# Altium footprint library HFPB_01-PCBLib.PcbLib: 102 footprints (part 6 of 7)
Each footprint in its own frame and in the unit in brackets; x right, y up, seen from the top. Pads: shape width x height; smd on the part's side, far side on the other; paste and mask are expansions set on the pad; w line width, h text height; cw(c..) or ccw(c..) is an arc to the next point about the centre after c.
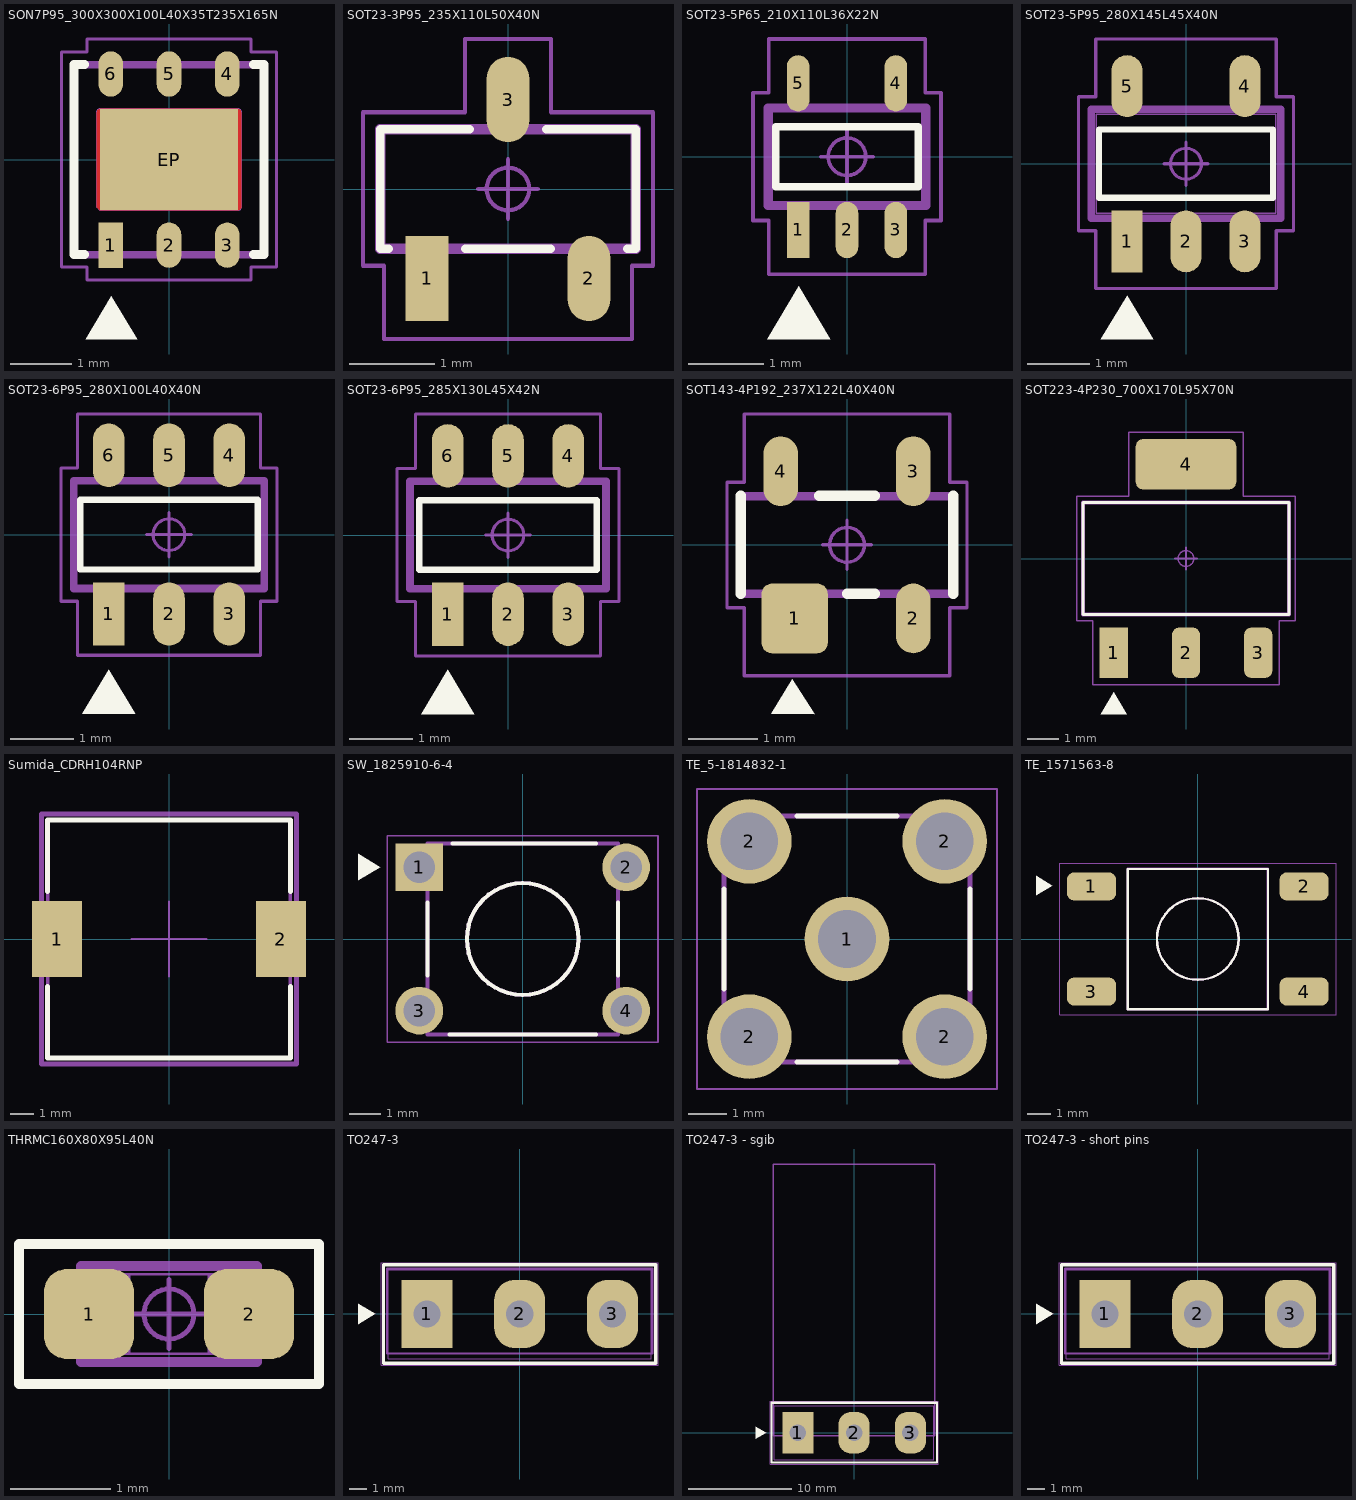
[diagram p5: the footprints below, top view; thin cyan lines are the x and y axes]

## SON7P95_300X300X100L40X35T235X165N [mm] "Small Outline No-Lead (SON with Tab), 0.95 mm pitch; 6 pin, 3.00 mm L X 3.00 mm W X 1.00 mm H body"
height 1
pads (7):
  rect 0.4x0.74 smd: 1(-0.95,-1.395)
  oval 0.4x0.74 smd: 2(0,-1.395) 3(0.95,-1.395) 4(0.95,1.395) 5(0,1.395) 6(-0.95,1.395)
  rect 2.25x1.65 smd paste-2.25 mask-2.25: EP(0,0)
Top Layer:
  region: 1.175,0 1.175,-0.775 1.174,-0.783 1.173,-0.79 1.17,-0.798 1.165,-0.804 1.16,-0.81 1.154,-0.816 1.148,-0.82 1.141,-0.823 1.133,-0.824 -1.125,-0.825 -1.175,-0.775 -1.175,0.775 -1.174,0.783 -1.173,0.79 -1.17,0.798 -1.165,0.804 -1.16,0.81 -1.154,0.816 -1.148,0.82 -1.141,0.823 -1.133,0.824 1.125,0.825 1.133,0.824 1.141,0.823 1.148,0.82 1.154,0.816 1.16,0.81 1.165,0.804 1.17,0.798 1.173,0.79 1.174,0.783 1.175,0.775
Top Overlay:
  region: -1.36,-2.925 -0.52,-2.925 -0.94,-2.225
  lines w0.15: -1.375,-1.55 -1.55,-1.55 -1.55,1.55 -1.375,1.55 ; 1.375,-1.55 1.55,-1.55 1.55,1.55 1.375,1.55
Top Paste:
  region: -0.12,0.12 -1.05,0.12 -1.05,0.7 -0.12,0.7
  region: -0.12,-0.7 -1.05,-0.7 -1.05,-0.12 -0.12,-0.12
  region: 1.05,0.12 0.12,0.12 0.12,0.7 1.05,0.7
  region: 1.05,-0.7 0.12,-0.7 0.12,-0.12 1.05,-0.12
Top Solder:
  region: 1.175,0 1.175,-0.775 1.174,-0.783 1.173,-0.79 1.17,-0.798 1.165,-0.804 1.16,-0.81 1.154,-0.816 1.148,-0.82 1.141,-0.823 1.133,-0.824 -1.125,-0.825 -1.175,-0.775 -1.175,0.775 -1.174,0.783 -1.173,0.79 -1.17,0.798 -1.165,0.804 -1.16,0.81 -1.154,0.816 -1.148,0.82 -1.141,0.823 -1.133,0.824 1.125,0.825 1.133,0.824 1.141,0.823 1.148,0.82 1.154,0.816 1.16,0.81 1.165,0.804 1.17,0.798 1.173,0.79 1.174,0.783 1.175,0.775
Mechanical 11:
  lines w0.12: -1.55,-1.55 1.55,-1.55 1.55,1.55 -1.55,1.55 -1.55,-1.55
Mechanical 12:
  lines w0.025: -1.5,-1.5 1.5,-1.5 1.5,1.5 -1.5,1.5 -1.5,-1.5 ; -1.175,-0.775 -1.125,-0.825 1.125,-0.825 ccw(c1.125,-0.775) 1.175,-0.775 1.175,0.775 ccw(c1.125,0.775) 1.125,0.825 -1.125,0.825 ccw(c-1.125,0.775) -1.175,0.775 -1.175,-0.775 ; -1.125,-1.5 -0.775,-1.5 -0.775,-1.275 ccw(c-0.95,-1.275) -1.125,-1.275 -1.125,-1.5 ; -1.125,1.275 ccw(c-0.95,1.275) -0.775,1.275 -0.775,1.5 -1.125,1.5 -1.125,1.275 ; -0.175,-1.5 0.175,-1.5 0.175,-1.275 ccw(c0,-1.275) -0.175,-1.275 -0.175,-1.5 ; -0.175,1.275 ccw(c0,1.275) 0.175,1.275 0.175,1.5 -0.175,1.5 -0.175,1.275 ; 0.775,-1.5 1.125,-1.5 1.125,-1.275 ccw(c0.95,-1.275) 0.775,-1.275 0.775,-1.5 ; 0.775,1.275 ccw(c0.95,1.275) 1.125,1.275 1.125,1.5 0.775,1.5 0.775,1.275
Mechanical 15:
  circle w0.05: c0,0 r0.25
  lines w0.05: -0.35,0 0.35,0 ; 0,-0.35 0,0.35 ; -1.75,-1.75 -1.335,-1.75 -1.335,-1.965 1.335,-1.965 1.335,-1.75 1.75,-1.75 1.75,1.75 1.335,1.75 1.335,1.965 -1.335,1.965 -1.335,1.75 -1.75,1.75 -1.75,-1.75
Mechanical 16:
  text ".Designator" at 0,0 h1.2
3D body "SON7P95_300X300X100L40X35T235X165.STEP": height 1, standoff 0, extent -1.5,-1.55 1.5,1.55

## SOT23-3P95_235X110L50X40N [mm] "Small Outline Transistor (SOT23), 0.95 mm pitch; 3 pin, 2.90 mm L X 1.30 mm W X 1.10 mm H body"
height 1.1
pads (3):
  rect 0.5x1 smd: 1(-0.95,-1.05)
  oval 0.5x1 smd: 2(0.95,-1.05) 3(0,1.05)
Top Overlay:
  lines w0.1: -1.4,-0.7 -1.5,-0.7 -1.5,0.7 -0.45,0.7 ; -0.5,-0.7 0.5,-0.7 ; 0.45,0.7 1.5,0.7 1.5,-0.7 1.4,-0.7
Mechanical 11:
  lines w0.12: -1.5,-0.7 1.5,-0.7 1.5,0.7 -1.5,0.7 -1.5,-0.7
Mechanical 12:
  lines w0.025: -1.45,-0.65 1.45,-0.65 1.45,0.65 -1.45,0.65 -1.45,-0.65 ; -1.15,-1.175 -1.15,-0.675 -0.75,-0.675 -0.75,-1.175 -1.15,-1.175 ; -0.2,0.675 -0.2,1.175 0.2,1.175 0.2,0.675 -0.2,0.675 ; 0.75,-1.175 0.75,-0.675 1.15,-0.675 1.15,-1.175 0.75,-1.175
Mechanical 15:
  circle w0.05: c0,0 r0.25
  lines w0.05: -0.35,0 0.35,0 ; 0,-0.35 0,0.35 ; -1.7,-0.9 -1.455,-0.9 -1.455,-1.76 1.455,-1.76 1.455,-0.9 1.7,-0.9 1.7,0.9 0.505,0.9 0.505,1.76 -0.505,1.76 -0.505,0.9 -1.7,0.9 -1.7,-0.9
Mechanical 16:
  text ".Designator" at 0,0 h1.2
3D body "SOT23-3P95_235X110L50X40.STEP": height 1.1, standoff 0, extent -1.45,-1.175 1.45,1.175

## SOT23-5P65_210X110L36X22N [mm] "Small Outline Transistor (SOT23), 0.65 mm pitch; 5 pin, 2.00 mm L X 1.25 mm W X 1.10 mm H body"
height 1.1
pads (5):
  rect 0.3x0.75 smd: 1(-0.65,-0.975)
  oval 0.3x0.75 smd: 2(0,-0.975) 3(0.65,-0.975) 4(0.65,0.975) 5(-0.65,0.975)
Top Overlay:
  region: -1.06,-2.425 -0.22,-2.425 -0.64,-1.725
  lines w0.1: -0.95,-0.4 0.95,-0.4 0.95,0.4 -0.95,0.4 -0.95,-0.4
Mechanical 11:
  lines w0.12: -1.05,-0.65 -1.05,0.65 1.05,0.65 1.05,-0.65 -1.05,-0.65
Mechanical 12:
  lines w0.025: -1,-0.625 -1,0.625 1,0.625 1,-0.625 -1,-0.625 ; -0.763,-1.05 -0.537,-1.05 -0.537,-0.69 -0.763,-0.69 -0.763,-1.05 ; -0.763,0.69 -0.537,0.69 -0.537,1.05 -0.763,1.05 -0.763,0.69 ; -0.112,-1.05 0.112,-1.05 0.112,-0.69 -0.112,-0.69 -0.112,-1.05 ; 0.537,-1.05 0.763,-1.05 0.763,-0.69 0.537,-0.69 0.537,-1.05 ; 0.537,0.69 0.763,0.69 0.763,1.05 0.537,1.05 0.537,0.69
Mechanical 15:
  circle w0.05: c0,0 r0.25
  lines w0.05: -0.35,0 0.35,0 ; 0,-0.35 0,0.35 ; -1.25,-0.85 -1.25,0.85 -1.04,0.85 -1.04,1.565 1.04,1.565 1.04,0.85 1.25,0.85 1.25,-0.85 1.04,-0.85 1.04,-1.565 -1.04,-1.565 -1.04,-0.85 -1.25,-0.85
Mechanical 16:
  text ".Designator" at 0,0 h1.2
3D body "SOT23-5P65_210X110L36X22.STEP": height 1.12, standoff 0.02, extent -1,-1.05 1,1.05

## SOT23-5P95_280X145L45X40N [mm] "Small Outline Transistor (SOT23), 0.95 mm pitch; 5 pin, 2.90 mm L X 1.60 mm W X 1.45 mm H body"
height 1.45
pads (5):
  rect 0.5x1 smd: 1(-0.95,-1.25)
  oval 0.5x1 smd: 2(0,-1.25) 3(0.95,-1.25) 4(0.95,1.25) 5(-0.95,1.25)
Top Overlay:
  region: -1.37,-2.825 -0.53,-2.825 -0.95,-2.125
  lines w0.1: -1.4,-0.55 1.4,-0.55 1.4,0.55 -1.4,0.55 -1.4,-0.55
Mechanical 11:
  lines w0.12: -1.53,-0.88 1.53,-0.88 1.53,0.88 -1.53,0.88 -1.53,-0.88
Mechanical 12:
  lines w0.025: -1.45,-0.8 1.45,-0.8 1.45,0.8 -1.45,0.8 -1.45,-0.8 ; -1.15,-1.4 -1.15,-0.95 -0.75,-0.95 -0.75,-1.4 -1.15,-1.4 ; -1.15,0.95 -1.15,1.4 -0.75,1.4 -0.75,0.95 -1.15,0.95 ; -0.2,-1.4 -0.2,-0.95 0.2,-0.95 0.2,-1.4 -0.2,-1.4 ; 0.75,-1.4 0.75,-0.95 1.15,-0.95 1.15,-1.4 0.75,-1.4 ; 0.75,0.95 0.75,1.4 1.15,1.4 1.15,0.95 0.75,0.95
Mechanical 15:
  circle w0.05: c0,0 r0.25
  lines w0.05: -0.35,0 0.35,0 ; 0,-0.35 0,0.35 ; -1.73,-1.08 -1.455,-1.08 -1.455,-2.01 1.455,-2.01 1.455,-1.08 1.73,-1.08 1.73,1.08 1.455,1.08 1.455,2.01 -1.455,2.01 -1.455,1.08 -1.73,1.08 -1.73,-1.08
Mechanical 16:
  text ".Designator" at 0,0 h1.2
3D body "SOT23-5P95_280X145L45X40.STEP": height 1.55, standoff 0.1, extent -1.45,-1.4 1.45,1.4

## SOT23-6P95_280X100L40X40N [mm] "Small Outline Transistor (SOT23), 0.95 mm pitch; 6 pin, 2.90 mm L X 1.60 mm W X 1.00 mm H body"
height 1
pads (6):
  rect 0.5x1 smd: 1(-0.95,-1.25)
  oval 0.5x1 smd: 2(0,-1.25) 3(0.95,-1.25) 4(0.95,1.25) 5(0,1.25) 6(-0.95,1.25)
Top Overlay:
  region: -1.37,-2.825 -0.53,-2.825 -0.95,-2.125
  lines w0.1: -1.4,-0.55 1.4,-0.55 1.4,0.55 -1.4,0.55 -1.4,-0.55
Mechanical 11:
  lines w0.12: -1.5,-0.85 -1.5,0.85 1.5,0.85 1.5,-0.85 -1.5,-0.85
Mechanical 12:
  lines w0.025: -1.45,-0.8 -1.45,0.8 1.45,0.8 1.45,-0.8 -1.45,-0.8 ; -1.15,-1.4 -0.75,-1.4 -0.75,-1 -1.15,-1 -1.15,-1.4 ; -1.15,1 -0.75,1 -0.75,1.4 -1.15,1.4 -1.15,1 ; -0.2,-1.4 0.2,-1.4 0.2,-1 -0.2,-1 -0.2,-1.4 ; -0.2,1 0.2,1 0.2,1.4 -0.2,1.4 -0.2,1 ; 0.75,-1.4 1.15,-1.4 1.15,-1 0.75,-1 0.75,-1.4 ; 0.75,1 1.15,1 1.15,1.4 0.75,1.4 0.75,1
Mechanical 15:
  circle w0.05: c0,0 r0.25
  lines w0.05: -0.35,0 0.35,0 ; 0,-0.35 0,0.35 ; -1.7,-1.05 -1.7,1.05 -1.44,1.05 -1.44,1.9 1.44,1.9 1.44,1.05 1.7,1.05 1.7,-1.05 1.44,-1.05 1.44,-1.9 -1.44,-1.9 -1.44,-1.05 -1.7,-1.05
Mechanical 16:
  text ".Designator" at -1.625,2.175 h1.2
3D body "SOT23-6P95_280X100L40X40.STEP": height 1, standoff 0, extent -1.45,-1.4 1.45,1.4

## SOT23-6P95_285X130L45X42N [mm] "Small Outline Transistor (SOT23), 0.95 mm pitch; 6 pin, 3.00 mm L X 1.60 mm W X 1.30 mm H body"
height 1.3
pads (6):
  rect 0.5x1 smd: 1(-0.95,-1.25)
  oval 0.5x1 smd: 2(0,-1.25) 3(0.95,-1.25) 4(0.95,1.25) 5(0,1.25) 6(-0.95,1.25)
Top Overlay:
  region: -1.37,-2.825 -0.53,-2.825 -0.95,-2.125
  lines w0.1: -1.4,-0.55 1.4,-0.55 1.4,0.55 -1.4,0.55 -1.4,-0.55
Mechanical 11:
  lines w0.12: -1.55,-0.85 1.55,-0.85 1.55,0.85 -1.55,0.85 -1.55,-0.85
Mechanical 12:
  lines w0.025: -1.5,-0.8 1.5,-0.8 1.5,0.8 -1.5,0.8 -1.5,-0.8 ; -1.162,-1.425 -1.162,-0.975 -0.737,-0.975 -0.737,-1.425 -1.162,-1.425 ; -1.162,0.975 -1.162,1.425 -0.737,1.425 -0.737,0.975 -1.162,0.975 ; -0.212,-1.425 -0.212,-0.975 0.212,-0.975 0.212,-1.425 -0.212,-1.425 ; -0.212,0.975 -0.212,1.425 0.212,1.425 0.212,0.975 -0.212,0.975 ; 0.737,-1.425 0.737,-0.975 1.162,-0.975 1.162,-1.425 0.737,-1.425 ; 0.737,0.975 0.737,1.425 1.162,1.425 1.162,0.975 0.737,0.975
Mechanical 15:
  circle w0.05: c0,0 r0.25
  lines w0.05: -0.35,0 0.35,0 ; 0,-0.35 0,0.35 ; -1.75,-1.05 -1.46,-1.05 -1.46,-1.91 1.46,-1.91 1.46,-1.05 1.75,-1.05 1.75,1.05 1.46,1.05 1.46,1.91 -1.46,1.91 -1.46,1.05 -1.75,1.05 -1.75,-1.05
Mechanical 16:
  text ".Designator" at 0,0 h1.2
3D body "SOT23-6P95_285X130L45X42.STEP": height 1.3, standoff 0, extent -1.5,-1.425 1.5,1.425

## SOT143-4P192_237X122L40X40N [mm] "Small Outline Transistor (SOT143), 1.92 mm pitch; 4 pin, 2.92 mm L X 1.30 mm W X 1.22 mm H body"
height 1.22
pads (4):
  rrect31% 0.95x1 smd: 1(-0.75,-1.055)
  oval 0.5x1 smd: 2(0.95,-1.055) 3(0.95,1.055) 4(-0.95,1.055)
Top Overlay:
  region: -1.087,-2.425 -0.463,-2.425 -0.787,-1.925
  lines w0.15: -1.52,-0.7 -1.52,0.7 ; -0.4,0.7 0.4,0.7 ; 0,-0.7 0.4,-0.7 ; 1.52,-0.7 1.52,0.7
Mechanical 11:
  lines w0.12: -1.52,-0.7 -1.52,0.7 1.52,0.7 1.52,-0.7 -1.52,-0.7
Mechanical 12:
  lines w0.025: -1.46,-0.65 -1.46,0.65 1.46,0.65 1.46,-0.65 -1.46,-0.65 ; -1.172,-1.185 -0.347,-1.185 -0.347,-0.785 -1.172,-0.785 -1.172,-1.185 ; -1.16,0.785 -0.76,0.785 -0.76,1.185 -1.16,1.185 -1.16,0.785 ; 0.76,-1.185 1.16,-1.185 1.16,-0.785 0.76,-0.785 0.76,-1.185 ; 0.76,0.785 1.16,0.785 1.16,1.185 0.76,1.185 0.76,0.785
Mechanical 15:
  circle w0.05: c0,0 r0.25
  lines w0.05: -0.35,0 0.35,0 ; 0,-0.35 0,0.35 ; -1.72,-0.9 -1.72,0.9 -1.475,0.9 -1.475,1.875 1.475,1.875 1.475,0.9 1.72,0.9 1.72,-0.9 1.475,-0.9 1.475,-1.875 -1.475,-1.875 -1.475,-0.9 -1.72,-0.9
Mechanical 16:
  text ".Designator" at 0,0 h1.2
3D body "SOT143-4P192_237X122L40X40.STEP": height 1.22, standoff 0, extent -1.46,-1.185 1.46,1.185

## SOT223-4P230_700X170L95X70N [mm] "Small Outline Transistor (SOT223), 2.30 mm pitch; 4 pin, 6.50 mm L X 3.50 mm W X 1.70 mm H body"
height 1.7
pads (4):
  rect 0.9x1.6 smd: 1(-2.3,-3)
  rrect51% 0.9x1.6 smd: 2(0,-3) 3(2.3,-3)
  rrect28% 3.2x1.6 smd: 4(0,3)
Top Overlay:
  region: -2.72,-4.95 -1.88,-4.95 -2.3,-4.25
  lines w0.1: -3.28,-1.78 -3.28,1.78 3.28,1.78 3.28,-1.78 -3.28,-1.78
Mechanical 11:
  lines w0.12: -3.28,-1.78 3.28,-1.78 3.28,1.78 -3.28,1.78 -3.28,-1.78
Mechanical 12:
  lines w0.025: -3.25,-1.75 3.25,-1.75 3.25,1.75 -3.25,1.75 -3.25,-1.75 ; -2.65,-3.5 -2.65,-2.55 -1.95,-2.55 -1.95,-3.5 -2.65,-3.5 ; -1.5,2.55 -1.5,3.5 1.5,3.5 1.5,2.55 -1.5,2.55 ; -0.35,-3.5 -0.35,-2.55 0.35,-2.55 0.35,-3.5 -0.35,-3.5 ; 1.95,-3.5 1.95,-2.55 2.65,-2.55 2.65,-3.5 1.95,-3.5
Mechanical 15:
  circle w0.05: c0,0 r0.25
  lines w0.05: -0.35,0 0.35,0 ; 0,-0.35 0,0.35 ; -3.48,-1.98 -2.975,-1.98 -2.975,-4.015 2.975,-4.015 2.975,-1.98 3.48,-1.98 3.48,1.98 1.825,1.98 1.825,4.015 -1.825,4.015 -1.825,1.98 -3.48,1.98 -3.48,-1.98
Mechanical 16:
  text ".Designator" at 0,0 h1.2
3D body "SOT223-4P230_700X170L95X70.STEP": height 1.7, standoff 0, extent -3.25,-3.5 3.25,3.5

## Sumida_CDRH104RNP [mm]
height 4
pads (2):
  rect 2.1x3.2 smd paste+0 mask+0: 1(-4.7,0) 2(4.7,0)
Top Overlay:
  lines w0.2: -5.1,-2 -5.1,-5 5.1,-5 5.1,-2 ; -5.1,2 -5.1,5 5.1,5 5.1,2
Mechanical 11:
  lines w0.2: -5.35,-5.25 -5.35,5.25 5.35,5.25 5.35,-5.25 -5.35,-5.25
  text ".Designator" at -2.3,3.2 h1
Mechanical 12:
  lines w0.152: -5.1,-5 -5.1,5 5.1,5 5.1,-5 -5.1,-5
Mechanical 15:
  lines w0.1: -1.575,0 1.575,0 ; 0,-1.575 0,1.575
  lines w0.2: -5.35,-5.25 -5.35,5.25 5.35,5.25 5.35,-5.25 -5.35,-5.25
3D body "3dmodel.step": height 0.25, standoff 0, extent -5.35,-5.25 5.35,5.25

## SW_1825910-6-4 [mm]
pads (4):
  rect 1.498x1.498 hole 0.99: 1(-3.25,2.25)
  round 1.498 hole 0.99: 2(3.25,2.25) 3(-3.25,-2.25) 4(3.25,-2.25)
Top Overlay:
  circle w0.127: c0,0 r1.755
  region: -5.175,2.68 -5.175,1.84 -4.475,2.26
  lines w0.127: -2.995,-1.15 -2.995,1.15 ; -2.3,-2.995 2.3,-2.995 ; -2.2,2.995 2.3,2.995 ; 3,-1.15 3,1.15
Mechanical 13:
  circle w0.127: c0,0 r1.755
  lines w0.127: -2.995,-2.995 2.995,-2.995 2.995,2.995 -2.995,2.995 -2.995,-2.995
Mechanical 15:
  lines w0.05: -4.25,-3.25 4.25,-3.25 4.25,3.25 -4.25,3.25 -4.25,-3.25
3D body "c-1825910-6-c-3d.stp": height 5, standoff -3.51, extent -3.875,-2.99 3.925,3

## TE_5-1814832-1 [mm]
pads (5):
  round 2.2 / inner round 2.2 / far side round 2.4 hole 1.5: 1(0,0) 2(-2.54,-2.54) 2(-2.54,2.54) 2(2.54,-2.54) 2(2.54,2.54)
Top Overlay:
  lines w0.127: -3.2,-1.3 -3.2,1.3 ; -1.3,-3.2 1.3,-3.2 ; -1.3,3.2 1.3,3.2 ; 3.2,-1.3 3.2,1.3
Mechanical 13:
  lines w0.127: -3.2,-3.2 3.2,-3.2 3.2,3.2 -3.2,3.2 -3.2,-3.2
Mechanical 15:
  lines w0.05: -3.9,-3.9 3.9,-3.9 3.9,3.9 -3.9,3.9 -3.9,-3.9
3D body "c-5-1814832-1-b-3d+.stp": height 9.5, standoff -4, extent -3.2,-3.2 3.2,3.2

## TE_1571563-8 [mm]
height 5
pads (4):
  rrect50% 2.1x1.2 smd: 1(-4.55,2.25) 2(4.55,2.25) 3(-4.55,-2.25) 4(4.55,-2.25)
Top Overlay:
  circle w0.1: c0,0 r1.75
  region: -6.925,2.705 -6.925,1.865 -6.225,2.285
  lines w0.1: -3,-2.997 -3,2.997 3.002,2.997 3.002,-3 -2.992,-3
Mechanical 13:
  circle w0.1: c0,0 r1.75
  lines w0.1: -3,-3 -3,3 3,3 3,-3 -3,-3
Mechanical 15:
  lines w0.05: -5.914,-3.25 -5.914,3.25 5.914,3.25 5.914,-3.25 -5.914,-3.25
3D body "TL3301AFxxxxG.stp": height 5.12, standoff 0.02, extent -5,-3 5,3

## THRMC160X80X95L40N [mm] "Thermistor, Chip; 1.60 mm L X 0.80 mm W X 0.95 mm H body"
height 0.95
pads (2):
  rrect51% 0.9x0.9 smd: 1(-0.8,0) 2(0.8,0)
Top Overlay:
  lines w0.1: -1.5,-0.7 -1.5,0.7 1.5,0.7 1.5,-0.7 -1.5,-0.7
Mechanical 11:
  lines w0.1: -0.88,-0.48 0.88,-0.48 0.88,0.48 -0.88,0.48 -0.88,-0.48
Mechanical 12:
  lines w0.025: -0.8,-0.4 0.8,-0.4 ; -0.8,-0.4 -0.8,0.4 ; -0.8,-0.4 -0.8,0.4 ; -0.8,-0.4 -0.4,-0.4 -0.4,0.4 -0.8,0.4 ; -0.8,0.4 0.8,0.4 ; 0.8,-0.4 0.8,0.4 ; 0.8,-0.4 0.4,-0.4 0.4,0.4 0.8,0.4 ; 0.8,-0.4 0.8,0.4
Mechanical 15:
  circle w0.05: c0,0 r0.25
  lines w0.05: -0.345,0 0.345,0 ; 0,-0.345 0,0.345 ; -1.5,-0.7 1.5,-0.7 1.5,0.7 ; -1.5,-0.7 -1.5,0.7 ; -1.5,-0.7 -1.5,0.7 ; -1.5,0.7 1.5,0.7 ; -1.5,0.7 1.5,0.7
Mechanical 16:
  text ".Designator" at 0,0 h1.2
3D body "THRMC160X80X95L40.STEP": height 0.95, standoff 0, extent -0.8,-0.4 0.8,0.4

## TO247-3 [mm]
height 24
pads (3):
  rect 3x4 hole 1.6: 1(-5.45,0)
  rrect80% 3x4 hole 1.6: 2(0,0) 3(5.45,0)
Top Overlay:
  region: -9.5,0.6 -9.5,-0.6 -8.5,0
  lines w0.2: -8,-2.9 8,-2.9 8,2.9 -8,2.9 -8,-2.9
Mechanical 12:
  lines w0.025: -5.975,-0.375 -5.975,0.375 -4.975,0.375 -4.975,-0.375 -5.975,-0.375 ; -0.5,-0.375 0.5,-0.375 0.5,0.375 -0.5,0.375 -0.5,-0.375 ; 4.975,-0.375 5.975,-0.375 5.975,0.375 4.975,0.375 4.975,-0.375
  lines w0.05: -7.725,-2.625 7.725,-2.625 7.725,2.6 -7.725,2.6 -7.725,-2.625
Mechanical 13:
  lines w0.127: -7.8,-2.325 7.8,-2.325 7.8,2.675 -7.8,2.675 -7.8,-2.325
Mechanical 15:
  circle w0.05: c0,0 r0.25
  lines w0.05: -0.35,0 0.35,0 ; 0,-0.35 0,0.35 ; -8.125,-3.025 8.125,-3.025 8.125,3.025 -8.125,3.025 -8.125,-3.025
Mechanical 16:
  text ".Designator" at 0,0 h1.2
3D body "TO247.STEP": height 24.7, standoff -10.4, extent -7.8,-2.325 7.8,2.675

## TO247-3 - sgib [mm]
height 24
pads (3):
  rect 3x4 hole 1.6: 1(-5.45,0)
  rrect80% 3x4 hole 1.6: 2(0,0) 3(5.45,0)
Top Overlay:
  region: -9.5,0.6 -9.5,-0.6 -8.5,0
  lines w0.2: -8,-2.9 8,-2.9 8,2.9 -8,2.9 -8,-2.9
Mechanical 12:
  lines w0.025: -5.975,-0.375 -5.975,0.375 -4.975,0.375 -4.975,-0.375 -5.975,-0.375 ; -0.5,-0.375 0.5,-0.375 0.5,0.375 -0.5,0.375 -0.5,-0.375 ; 4.975,-0.375 5.975,-0.375 5.975,0.375 4.975,0.375 4.975,-0.375
  lines w0.05: -7.725,-2.625 7.725,-2.625 7.725,2.6 -7.725,2.6 -7.725,-2.625
Mechanical 13:
  lines w0.127: -7.8,-0.3 -7.8,26 7.8,26 7.8,-0.3 -7.8,-0.3
Mechanical 15:
  circle w0.05: c0,0 r0.25
  lines w0.05: -0.35,0 0.35,0 ; 0,-0.35 0,0.35 ; -8.125,-3.025 8.125,-3.025 8.125,3.025 -8.125,3.025 -8.125,-3.025
Mechanical 16:
  text ".Designator" at 0,0 h1.2
3D body "TO247-sgib.stp": height 5.7, standoff -2.3, extent -7.8,-0.3 7.8,26.002

## TO247-3 - short pins [mm]
height 24
pads (3):
  rect 3x4 hole 1.6: 1(-5.45,0)
  rrect80% 3x4 hole 1.6: 2(0,0) 3(5.45,0)
Top Overlay:
  region: -9.5,0.6 -9.5,-0.6 -8.5,0
  lines w0.2: -8,-2.9 8,-2.9 8,2.9 -8,2.9 -8,-2.9
Mechanical 12:
  lines w0.025: -5.975,-0.375 -5.975,0.375 -4.975,0.375 -4.975,-0.375 -5.975,-0.375 ; -0.5,-0.375 0.5,-0.375 0.5,0.375 -0.5,0.375 -0.5,-0.375 ; 4.975,-0.375 5.975,-0.375 5.975,0.375 4.975,0.375 4.975,-0.375
  lines w0.05: -7.725,-2.625 7.725,-2.625 7.725,2.6 -7.725,2.6 -7.725,-2.625
Mechanical 13:
  lines w0.127: -7.8,-2.325 7.8,-2.325 7.8,2.675 -7.8,2.675 -7.8,-2.325
Mechanical 15:
  circle w0.05: c0,0 r0.25
  lines w0.05: -0.35,0 0.35,0 ; 0,-0.35 0,0.35 ; -8.125,-3.025 8.125,-3.025 8.125,3.025 -8.125,3.025 -8.125,-3.025
Mechanical 16:
  text ".Designator" at 0,0 h1.2
3D body "TO247-short.stp": height 24.7, standoff -2.07, extent -7.8,-2.3 7.8,2.7